# Altium footprint library WPME-FISM.PcbLib: 35 footprints (part 3 of 3)
Each footprint in its own frame and in the unit in brackets; x right, y up, seen from the top. Pads: shape width x height; smd on the part's side, far side on the other; paste and mask are expansions set on the pad; w line width, h text height; cw(c..) or ccw(c..) is an arc to the next point about the centre after c.
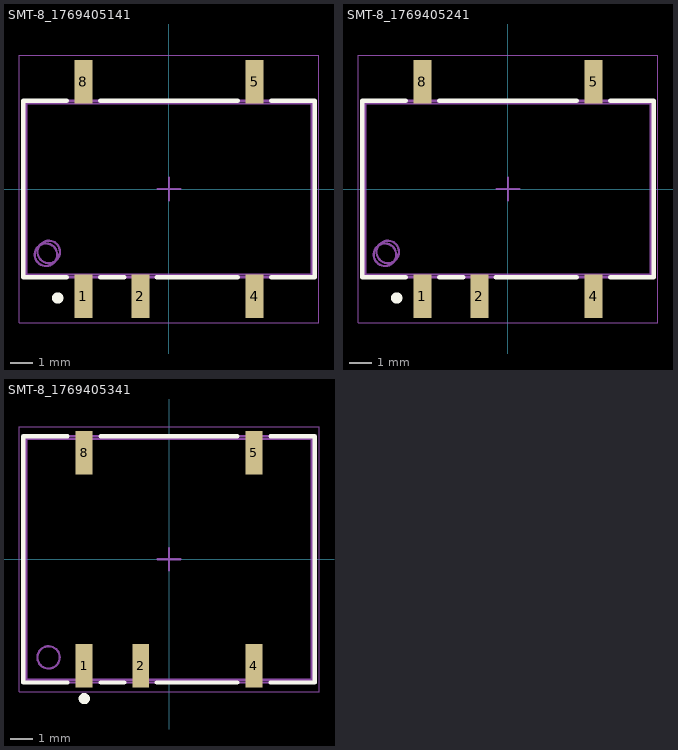
[diagram p2: the footprints below, top view; thin cyan lines are the x and y axes]

## SMT-8_1769405141 [mm] "Power Module, SMT, body 12.7 x 11.05 x 6.25mm"
height 6.25
pads (5):
  rect 0.8x1.95 smd: 1(-3.81,-4.775) 2(-1.27,-4.775) 4(3.81,-4.775) 5(3.81,4.775) 8(-3.81,4.775)
Top Overlay:
  circle w0.25: c-4.95,-4.85 r0.125
  lines w0.2: -4.55,-3.925 -6.475,-3.925 -6.475,3.925 -4.55,3.925 ; -3.07,-3.925 -2,-3.925 ; -3.07,3.925 3.07,3.925 ; -0.55,-3.925 3.07,-3.925 ; 4.55,-3.925 6.475,-3.925 6.475,3.925 4.55,3.925
Top Assembly:
  circle w0.1: c-5.475,-2.925 r0.5
  lines w0.1: -6.475,-3.925 6.475,-3.925 6.475,3.925 -6.475,3.925 -6.475,-3.925
Top Designator:
  text ".Designator" at -3.647,-0.357 h1
Top 3D Body:
  circle w0.1: c-5.35,-2.8 r0.5
  lines w0.1: -6.35,-3.8 -6.35,3.8 6.35,3.8 6.35,-3.8 -6.35,-3.8
Top Courtyard:
  lines w0.05: -6.675,-5.95 -6.675,5.95 6.675,5.95 6.675,-5.95 -6.675,-5.95
Top Component Center:
  lines w0.1: -0.5,0 0.5,0 ; 0,-0.5 0,0.5
3D body "1769405141.stp": height 6.35, standoff 0, extent -6.35,-5.525 6.35,5.525

## SMT-8_1769405241 [mm] "Power Module, SMT, body 12.7 x 11.05 x 6.25mm"
height 6.25
pads (5):
  rect 0.8x1.95 smd: 1(-3.81,-4.775) 2(-1.27,-4.775) 4(3.81,-4.775) 5(3.81,4.775) 8(-3.81,4.775)
Top Overlay:
  circle w0.25: c-4.95,-4.85 r0.125
  lines w0.2: -4.55,-3.925 -6.475,-3.925 -6.475,3.925 -4.55,3.925 ; -3.07,-3.925 -2,-3.925 ; -3.07,3.925 3.07,3.925 ; -0.55,-3.925 3.07,-3.925 ; 4.55,-3.925 6.475,-3.925 6.475,3.925 4.55,3.925
Top Assembly:
  circle w0.1: c-5.475,-2.925 r0.5
  lines w0.1: -6.475,-3.925 -6.475,3.925 6.475,3.925 6.475,-3.925 -6.475,-3.925
Top Designator:
  text ".Designator" at -3.647,-0.357 h1
Top 3D Body:
  circle w0.1: c-5.35,-2.8 r0.5
  lines w0.1: -6.35,-3.8 6.35,-3.8 6.35,3.8 -6.35,3.8 -6.35,-3.8
Top Courtyard:
  lines w0.05: -6.675,-5.95 6.675,-5.95 6.675,5.95 -6.675,5.95 -6.675,-5.95
Top Component Center:
  lines w0.1: -0.5,0 0.5,0 ; 0,-0.5 0,0.5
3D body "1769405241.stp": height 6.35, standoff 0, extent -6.35,-5.525 6.35,5.525

## SMT-8_1769405341 [mm] "Power Module, SMT"
height 6.9
pads (5):
  rect 0.75x1.95 smd: 1(-3.81,-4.775) 2(-1.27,-4.775) 4(3.81,-4.775) 5(3.81,4.775) 8(-3.81,4.775)
Top Overlay:
  circle w0.25: c-3.8,-6.25 r0.125
  lines w0.2: -4.55,-5.525 -6.525,-5.525 -6.525,5.525 -4.55,5.525 ; -3.07,-5.525 -2,-5.525 ; -3.07,5.525 3.07,5.525 ; -0.55,-5.525 3.07,-5.525 ; 4.55,-5.525 6.525,-5.525 6.525,5.525 4.55,5.525
Top Assembly:
  circle w0.1: c-5.4,-4.4 r0.5
  lines w0.1: -6.525,-5.525 6.525,-5.525 6.525,5.525 -6.525,5.525 -6.525,-5.525
Top Designator:
  text ".Designator" at -3.647,-0.357 h1
Top 3D Body:
  circle w0.1: c-5.4,-4.4 r0.5
  lines w0.1: -6.4,-5.4 -6.4,5.4 6.4,5.4 6.4,-5.4 -6.4,-5.4
Top Courtyard:
  lines w0.05: -6.725,-5.95 -6.725,5.95 6.725,5.95 6.725,-5.95 -6.725,-5.95
Top Component Center:
  lines w0.1: -0.5,0 0.5,0 ; 0,-0.5 0,0.5
3D body "1769405341.stp": height 7.1, standoff 0, extent -6.4,-5.55 6.4,5.55